# Altium footprint library Miscellaneous Connectors.PcbLib: 245 footprints (part 3 of 16)
Each footprint in its own frame and in the unit in brackets; x right, y up, seen from the top. Pads: shape width x height; smd on the part's side, far side on the other; paste and mask are expansions set on the pad; w line width, h text height; cw(c..) or ccw(c..) is an arc to the next point about the centre after c.
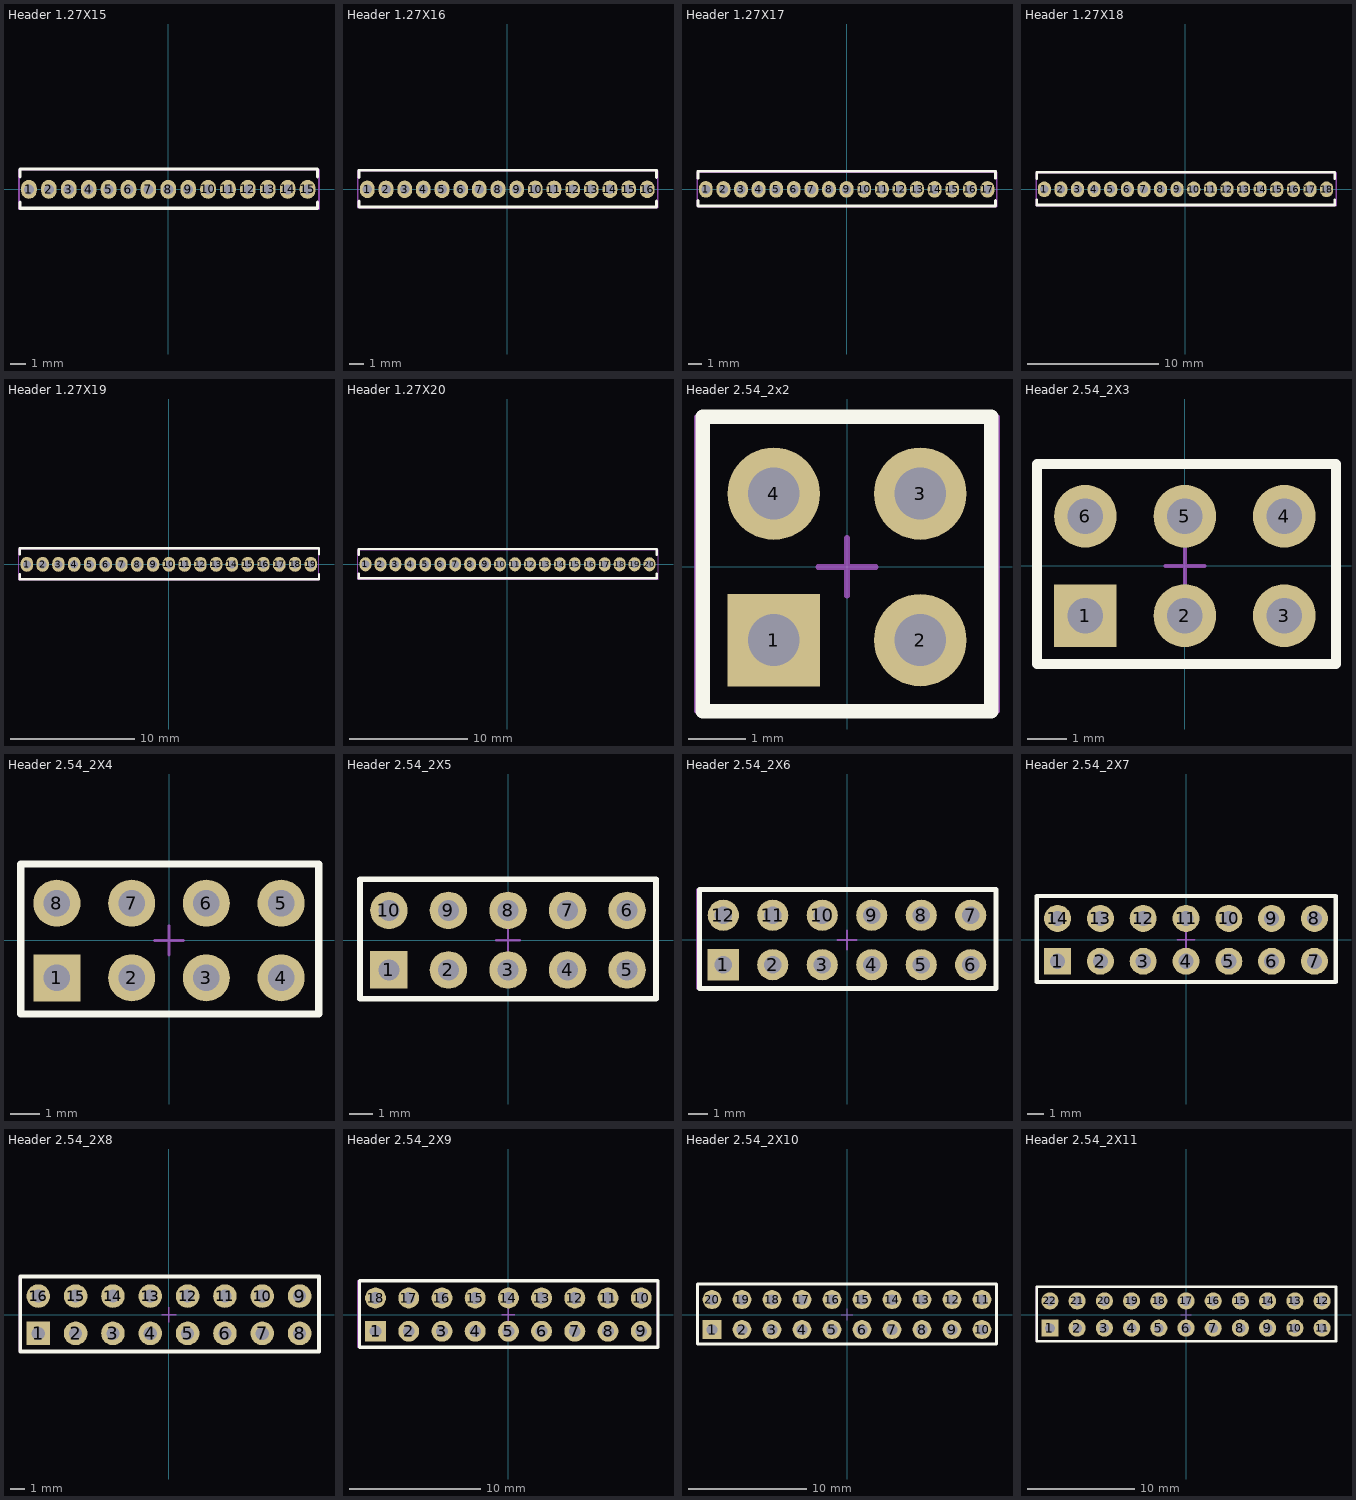
[diagram p2: the footprints below, top view; thin cyan lines are the x and y axes]

## Header 1.27X15 [mm]
pads (15):
  oval 1x1.2 hole 0.65: 1(-8.89,0) 2(-7.62,0) 3(-6.35,0) 4(-5.08,0) 5(-3.81,0) 6(-2.54,0) 7(-1.27,0) 8(0,0) 9(1.27,0) 10(2.54,0) 11(3.81,0) 12(5.08,0) 13(6.35,0) 14(7.62,0) 15(8.89,0)
Top Overlay:
  lines w0.2: -9.455,-0.8 -9.455,-1.2 9.52,-1.2 9.52,-0.8 ; -9.455,0.8 -9.455,1.3 9.52,1.3 9.52,0.8
Mechanical 15:
  lines w0.1: -9.525,-1.25 -9.525,1.25 9.62,1.25 9.62,-1.25 -9.525,-1.25
3D body: height 5.34, standoff -2.6, extent -9.495,-1.25 9.555,1.25

## Header 1.27X16 [mm]
pads (16):
  oval 1x1.2 hole 0.65: 1(-9.525,0) 2(-8.255,0) 3(-6.985,0) 4(-5.715,0) 5(-4.445,0) 6(-3.175,0) 7(-1.905,0) 8(-0.635,0) 9(0.635,0) 10(1.905,0) 11(3.175,0) 12(4.445,0) 13(5.715,0) 14(6.985,0) 15(8.255,0) 16(9.525,0)
Top Overlay:
  lines w0.2: -10.09,-0.8 -10.09,-1.2 10.155,-1.2 10.155,-0.8 ; -10.09,0.8 -10.09,1.3 10.155,1.3 10.155,0.8
Mechanical 15:
  lines w0.1: -10.16,-1.25 10.255,-1.25 10.255,1.25 -10.16,1.25 -10.16,-1.25
3D body: height 5.34, standoff -2.6, extent -10.13,-1.25 10.19,1.25

## Header 1.27X17 [mm]
pads (17):
  oval 1x1.2 hole 0.65: 1(-10.16,0) 2(-8.89,0) 3(-7.62,0) 4(-6.35,0) 5(-5.08,0) 6(-3.81,0) 7(-2.54,0) 8(-1.27,0) 9(0,0) 10(1.27,0) 11(2.54,0) 12(3.81,0) 13(5.08,0) 14(6.35,0) 15(7.62,0) 16(8.89,0) 17(10.16,0)
Top Overlay:
  lines w0.2: -10.725,-0.8 -10.725,-1.2 10.75,-1.2 10.75,-0.8 ; -10.725,0.8 -10.725,1.3 10.75,1.3 10.75,0.8
Mechanical 15:
  lines w0.1: -10.795,-1.25 -10.795,1.25 10.85,1.25 10.85,-1.25 -10.795,-1.25
3D body: height 5.34, standoff -2.6, extent -10.765,-1.25 10.825,1.25

## Header 1.27X18 [mm]
pads (18):
  oval 1x1.2 hole 0.65: 1(-10.795,0) 2(-9.525,0) 3(-8.255,0) 4(-6.985,0) 5(-5.715,0) 6(-4.445,0) 7(-3.175,0) 8(-1.905,0) 9(-0.635,0) 10(0.635,0) 11(1.905,0) 12(3.175,0) 13(4.445,0) 14(5.715,0) 15(6.985,0) 16(8.255,0) 17(9.525,0) 18(10.795,0)
Top Overlay:
  lines w0.2: -11.36,-0.8 -11.36,-1.2 11.415,-1.2 11.415,-0.8 ; -11.36,0.8 -11.36,1.3 11.415,1.3 11.415,0.8
Mechanical 15:
  lines w0.1: -11.43,-1.25 11.515,-1.25 11.515,1.25 -11.43,1.25 -11.43,-1.25
3D body: height 5.34, standoff -2.6, extent -11.4,-1.25 11.46,1.25

## Header 1.27X19 [mm]
pads (19):
  oval 1x1.2 hole 0.65: 1(-11.43,0) 2(-10.16,0) 3(-8.89,0) 4(-7.62,0) 5(-6.35,0) 6(-5.08,0) 7(-3.81,0) 8(-2.54,0) 9(-1.27,0) 10(0,0) 11(1.27,0) 12(2.54,0) 13(3.81,0) 14(5.08,0) 15(6.35,0) 16(7.62,0) 17(8.89,0) 18(10.16,0) 19(11.43,0)
Top Overlay:
  lines w0.2: -11.995,-0.8 -11.995,-1.2 12.09,-1.2 12.09,-0.8 ; -11.995,0.8 -11.995,1.3 12.09,1.3 12.09,0.8
Mechanical 15:
  lines w0.1: -12.065,-1.25 -12.065,1.25 12.09,1.25 12.09,-1.25 -12.065,-1.25
3D body: height 5.34, standoff -2.6, extent -12.035,-1.25 12.095,1.25

## Header 1.27X20 [mm]
pads (20):
  oval 1x1.2 hole 0.65: 1(-12.065,0) 2(-10.795,0) 3(-9.525,0) 4(-8.255,0) 5(-6.985,0) 6(-5.715,0) 7(-4.445,0) 8(-3.175,0) 9(-1.905,0) 10(-0.635,0) 11(0.635,0) 12(1.905,0) 13(3.175,0) 14(4.445,0) 15(5.715,0) 16(6.985,0) 17(8.255,0) 18(9.525,0) 19(10.795,0) 20(12.065,0)
Top Overlay:
  lines w0.2: -12.63,-0.8 -12.63,-1.2 12.685,-1.2 12.685,-0.8 ; -12.63,0.8 -12.63,1.3 12.685,1.3 12.685,0.8
Mechanical 15:
  lines w0.1: -12.7,-1.25 12.785,-1.25 12.785,1.25 -12.7,1.25 -12.7,-1.25
3D body: height 5.34, standoff -2.6, extent -12.67,-1.25 12.73,1.25

## Header 2.54_2x2 [mm]
pads (4):
  rect 1.6x1.6 hole 0.9: 1(-1.27,-1.27)
  round 1.6 hole 0.9: 2(1.27,-1.27) 3(1.27,1.27) 4(-1.27,1.27)
Top Overlay:
  lines w0.254: -2.5,-2.5 -2.5,2.6 2.5,2.6 2.5,-2.5 -2.5,-2.5
Mechanical 15:
  lines w0.1: -0.5,0 0.5,0 ; 0,-0.5 0,0.5 ; -2.6,-2.5 -2.6,2.6 2.6,2.6 2.6,-2.5 -2.6,-2.5
3D body: height 8.6, standoff -2.9, extent -2.54,-2.5 2.54,2.58

## Header 2.54_2X3 [mm]
pads (6):
  rect 1.6x1.6 hole 0.9: 1(-2.54,-1.27)
  round 1.6 hole 0.9: 2(0,-1.27) 3(2.54,-1.27) 4(2.54,1.27) 5(0,1.27) 6(-2.54,1.27)
Top Overlay:
  lines w0.254: -3.77,-2.5 -3.77,2.6 3.86,2.6 3.86,-2.5 -3.77,-2.5
Mechanical 15:
  lines w0.1: -0.5,0 0.5,0 ; 0,-0.5 0,0.5 ; -3.8,-2.5 -3.8,2.6 3.8,2.6 3.8,-2.5 -3.8,-2.5
3D body: height 8.6, standoff -2.9, extent -3.81,-2.5 3.81,2.58

## Header 2.54_2X4 [mm]
pads (8):
  rect 1.6x1.6 hole 0.9: 1(-3.81,-1.27)
  round 1.6 hole 0.9: 2(-1.27,-1.27) 3(1.27,-1.27) 4(3.81,-1.27) 5(3.81,1.27) 6(1.27,1.27) 7(-1.27,1.27) 8(-3.81,1.27)
Top Overlay:
  lines w0.254: -5.04,-2.5 -5.04,2.6 5.09,2.6 5.09,-2.5 -5.04,-2.5
Mechanical 15:
  lines w0.1: -0.5,0 0.5,0 ; 0,-0.5 0,0.5 ; -5.1,-2.5 -5.1,2.6 5.1,2.6 5.1,-2.5 -5.1,-2.5
3D body: height 8.6, standoff -2.9, extent -5.08,-2.5 5.08,2.58

## Header 2.54_2X5 [mm]
pads (10):
  rect 1.6x1.6 hole 0.9: 1(-5.08,-1.27)
  round 1.6 hole 0.9: 2(-2.54,-1.27) 3(0,-1.27) 4(2.54,-1.27) 5(5.08,-1.27) 6(5.08,1.27) 7(2.54,1.27) 8(0,1.27) 9(-2.54,1.27) 10(-5.08,1.27)
Top Overlay:
  lines w0.254: -6.31,-2.5 6.32,-2.5 6.32,2.6 -6.31,2.6 -6.31,-2.5
Mechanical 15:
  lines w0.1: -0.5,0 0.5,0 ; 0,-0.5 0,0.5 ; -6.4,-2.5 6.4,-2.5 6.4,2.6 -6.4,2.6 -6.4,-2.5
3D body: height 8.6, standoff -2.9, extent -6.35,-2.5 6.35,2.58

## Header 2.54_2X6 [mm]
pads (12):
  rect 1.6x1.6 hole 0.9: 1(-6.35,-1.27)
  round 1.6 hole 0.9: 2(-3.81,-1.27) 3(-1.27,-1.27) 4(1.27,-1.27) 5(3.81,-1.27) 6(6.35,-1.27) 7(6.35,1.27) 8(3.81,1.27) 9(1.27,1.27) 10(-1.27,1.27) 11(-3.81,1.27) 12(-6.35,1.27)
Top Overlay:
  lines w0.254: -7.58,-2.5 -7.58,2.6 7.65,2.6 7.65,-2.5 -7.58,-2.5
Mechanical 15:
  lines w0.1: -0.5,0 0.5,0 ; 0,-0.5 0,0.5 ; -7.7,-2.5 -7.7,2.6 7.7,2.6 7.7,-2.5 -7.7,-2.5
3D body: height 8.6, standoff -2.9, extent -7.62,-2.5 7.62,2.58

## Header 2.54_2X7 [mm]
pads (14):
  rect 1.6x1.6 hole 0.9: 1(-7.62,-1.27)
  round 1.6 hole 0.9: 2(-5.08,-1.27) 3(-2.54,-1.27) 4(0,-1.27) 5(2.54,-1.27) 6(5.08,-1.27) 7(7.62,-1.27) 8(7.62,1.27) 9(5.08,1.27) 10(2.54,1.27) 11(0,1.27) 12(-2.54,1.27) 13(-5.08,1.27) 14(-7.62,1.27)
Top Overlay:
  lines w0.254: -8.85,-2.5 -8.85,2.6 8.88,2.6 8.88,-2.5 -8.85,-2.5
Mechanical 15:
  lines w0.1: -0.5,0 0.5,0 ; 0,-0.5 0,0.5 ; -8.9,-2.5 -8.9,2.6 8.9,2.6 8.9,-2.5 -8.9,-2.5
3D body: height 8.6, standoff -2.9, extent -8.89,-2.5 8.89,2.58

## Header 2.54_2X8 [mm]
pads (16):
  rect 1.6x1.6 hole 0.9: 1(-8.89,-1.27)
  round 1.6 hole 0.9: 2(-6.35,-1.27) 3(-3.81,-1.27) 4(-1.27,-1.27) 5(1.27,-1.27) 6(3.81,-1.27) 7(6.35,-1.27) 8(8.89,-1.27) 9(8.89,1.27) 10(6.35,1.27) 11(3.81,1.27) 12(1.27,1.27) 13(-1.27,1.27) 14(-3.81,1.27) 15(-6.35,1.27) 16(-8.89,1.27)
Top Overlay:
  lines w0.254: -10.12,-2.5 -10.12,2.6 10.21,2.6 10.21,-2.5 -10.12,-2.5
Mechanical 15:
  lines w0.1: -0.5,0 0.5,0 ; 0,-0.5 0,0.5 ; -10.2,-2.5 -10.2,2.6 10.2,2.6 10.2,-2.5 -10.2,-2.5
3D body: height 8.6, standoff -2.9, extent -10.16,-2.5 10.16,2.58

## Header 2.54_2X9 [mm]
pads (18):
  rect 1.6x1.6 hole 0.9: 1(-10.16,-1.27)
  round 1.6 hole 0.9: 2(-7.62,-1.27) 3(-5.08,-1.27) 4(-2.54,-1.27) 5(0,-1.27) 6(2.54,-1.27) 7(5.08,-1.27) 8(7.62,-1.27) 9(10.16,-1.27) 10(10.16,1.27) 11(7.62,1.27) 12(5.08,1.27) 13(2.54,1.27) 14(0,1.27) 15(-2.54,1.27) 16(-5.08,1.27) 17(-7.62,1.27) 18(-10.16,1.27)
Top Overlay:
  lines w0.254: -11.39,-2.5 11.44,-2.5 11.44,2.6 -11.39,2.6 -11.39,-2.5
Mechanical 15:
  lines w0.1: -0.5,0 0.5,0 ; 0,-0.5 0,0.5 ; -11.5,-2.5 11.4,-2.5 11.4,2.6 -11.5,2.6 -11.5,-2.5
3D body: height 8.6, standoff -2.9, extent -11.43,-2.5 11.43,2.58

## Header 2.54_2X10 [mm]
pads (20):
  rect 1.6x1.6 hole 0.9: 1(-11.43,-1.27)
  round 1.6 hole 0.9: 2(-8.89,-1.27) 3(-6.35,-1.27) 4(-3.81,-1.27) 5(-1.27,-1.27) 6(1.27,-1.27) 7(3.81,-1.27) 8(6.35,-1.27) 9(8.89,-1.27) 10(11.43,-1.27) 11(11.43,1.27) 12(8.89,1.27) 13(6.35,1.27) 14(3.81,1.27) 15(1.27,1.27) 16(-1.27,1.27) 17(-3.81,1.27) 18(-6.35,1.27) 19(-8.89,1.27) 20(-11.43,1.27)
Top Overlay:
  lines w0.254: -12.66,-2.5 -12.66,2.6 12.67,2.6 12.67,-2.5 -12.66,-2.5
Mechanical 15:
  lines w0.1: -0.5,0 0.5,0 ; 0,-0.5 0,0.5 ; -12.7,-2.5 -12.7,2.6 12.7,2.6 12.7,-2.5 -12.7,-2.5
3D body: height 8.6, standoff -2.9, extent -12.7,-2.5 12.7,2.58

## Header 2.54_2X11 [mm]
pads (22):
  rect 1.6x1.6 hole 0.9: 1(-12.7,-1.27)
  round 1.6 hole 0.9: 2(-10.16,-1.27) 3(-7.62,-1.27) 4(-5.08,-1.27) 5(-2.54,-1.27) 6(0,-1.27) 7(2.54,-1.27) 8(5.08,-1.27) 9(7.62,-1.27) 10(10.16,-1.27) 11(12.7,-1.27) 12(12.7,1.27) 13(10.16,1.27) 14(7.62,1.27) 15(5.08,1.27) 16(2.54,1.27) 17(0,1.27) 18(-2.54,1.27) 19(-5.08,1.27) 20(-7.62,1.27) 21(-10.16,1.27) 22(-12.7,1.27)
Top Overlay:
  lines w0.254: -13.93,-2.5 -13.93,2.6 14,2.6 14,-2.5 -13.93,-2.5
Mechanical 15:
  lines w0.1: -0.5,0 0.5,0 ; 0,-0.5 0,0.5 ; -14,-2.5 -14,2.6 14,2.6 14,-2.5 -14,-2.5
3D body: height 8.6, standoff -2.9, extent -13.97,-2.5 13.97,2.58